# Altium footprint library LDCFullN.PcbLib: 36 footprints (part 2 of 3)
Each footprint in its own frame and in the unit in brackets; x right, y up, seen from the top. Pads: shape width x height; smd on the part's side, far side on the other; paste and mask are expansions set on the pad; w line width, h text height; cw(c..) or ccw(c..) is an arc to the next point about the centre after c.
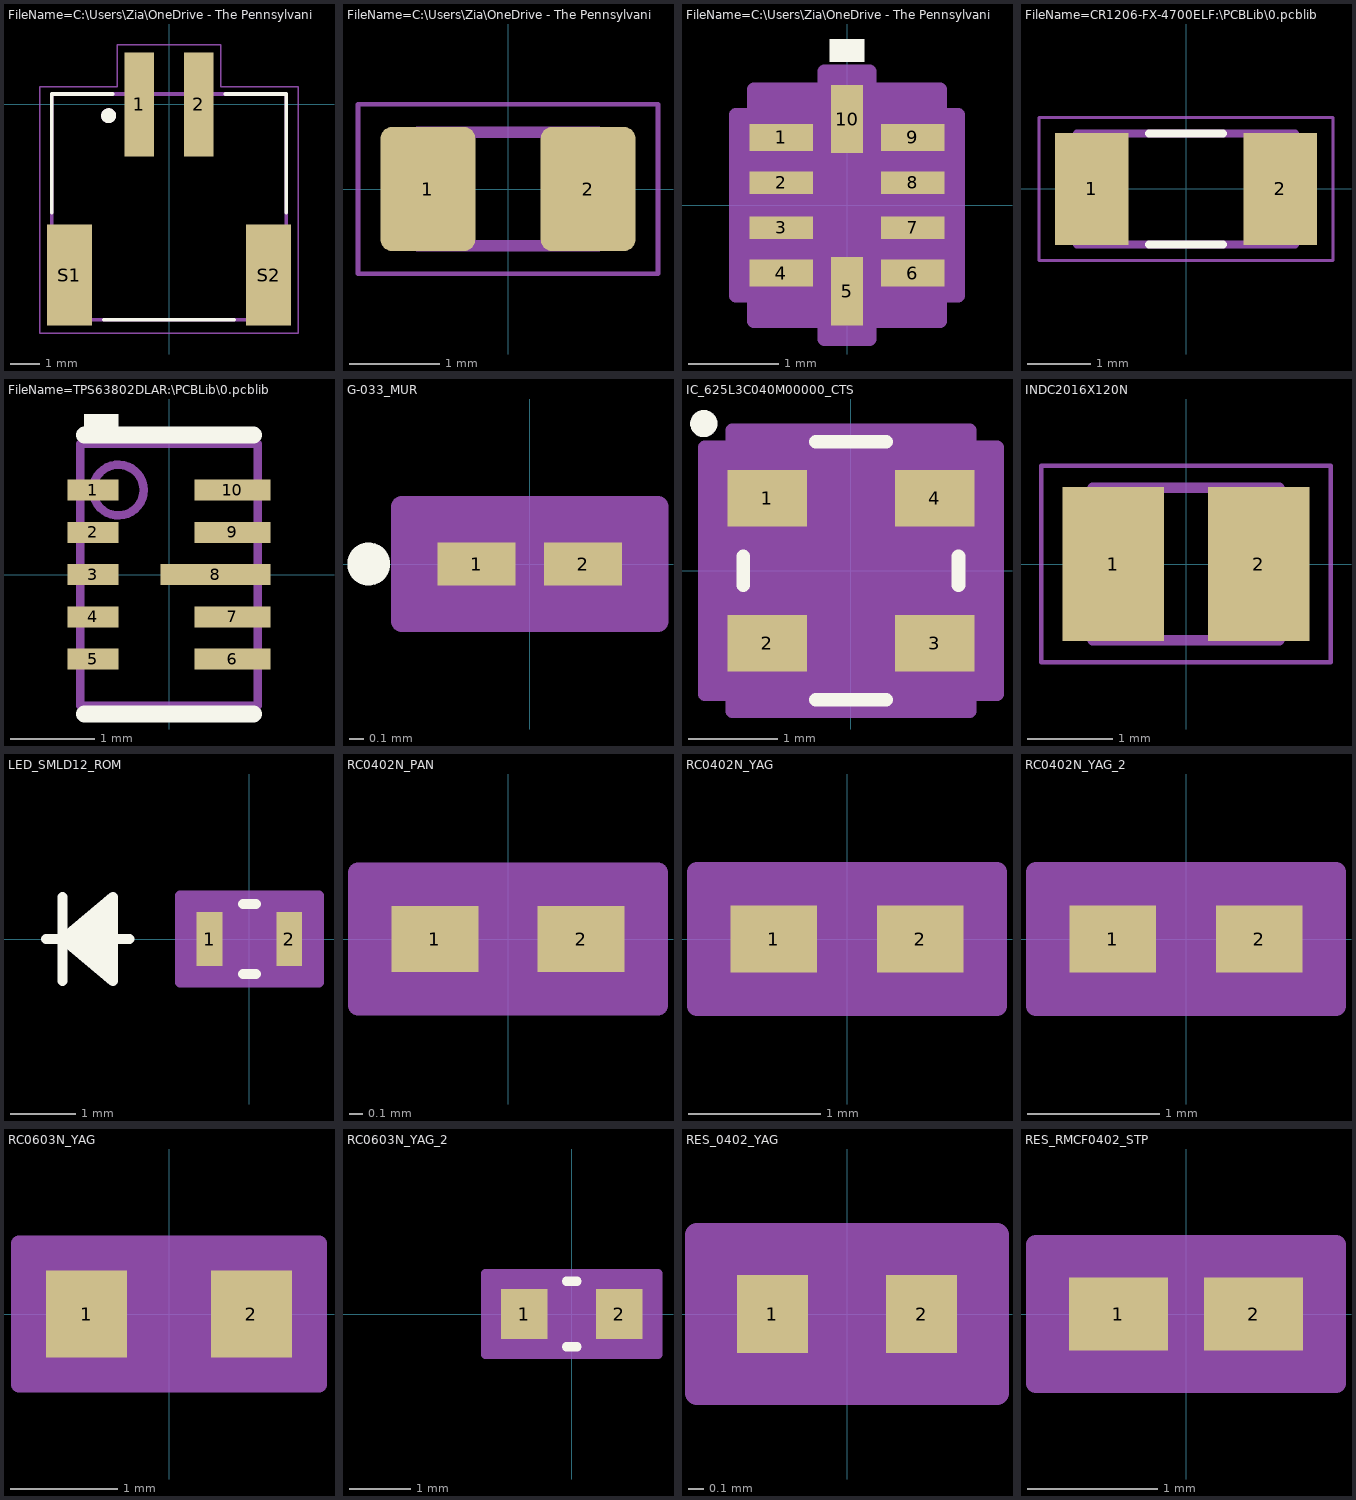
[diagram p1: the footprints below, top view; thin cyan lines are the x and y axes]

## FileName=C:\Users\Zia\OneDrive - The Pennsylvania State University\Desktop\LDCLast\Altium\S2B-PH-SM4-TB_LF__SN_2pin\JST_S2B-PH-SM4-TB(LF)(SN).PcbLib [mm]
pads (4):
  rect 1x3.5 smd: 1(-1,0) 2(1,0)
  rect 1.5x3.4 smd: S1(-3.35,-5.75) S2(3.35,-5.75)
Top Overlay:
  circle w0.3: c-2.032,-0.381 r0.1
  lines w0.127: -3.95,-3.65 -3.95,0.35 -1.9,0.35 ; -2.2,-7.25 2.2,-7.25 ; 1.9,0.35 3.95,0.35 3.95,-3.65
Mechanical 13:
  circle w0.3: c-2.032,-0.381 r0.1
  lines w0.127: -3.95,-7.25 -3.95,0.35 3.95,0.35 3.95,-7.25 -3.95,-7.25
Mechanical 15:
  lines w0.05: -4.35,-7.7 4.35,-7.7 4.35,0.6 1.75,0.6 1.75,2 -1.75,2 -1.75,0.6 -4.35,0.6 -4.35,-7.7
3D body "step_temp.STEP": height 5.5, standoff -0.1, extent -4.077,-7.965 3.823,0.635

## FileName=C:\Users\Zia\OneDrive - The Pennsylvania State University\Desktop\LDCLast\AltiumLib\CL21A106KPFNNNG (10,100U)\CAPC2012X135N.PcbLib [mm]
pads (2):
  rrect25% 1.05x1.38 smd: 1(-0.888,0) 2(0.888,0)
Mechanical 13:
  lines w0.127: -1,-0.63 1,-0.63 1,0.63 -1,0.63 -1,-0.63
Mechanical 15:
  lines w0.05: -1.663,-0.94 1.663,-0.94 1.663,0.94 -1.663,0.94 -1.663,-0.94
3D body "step_temp.STEP": height 1.35, standoff 0, extent -1,-0.625 1,0.625

## FileName=C:\Users\Zia\OneDrive - The Pennsylvania State University\Desktop\LDCLast\AltiumLib\TS5A23157RSER\TS5A23157RSER.PcbLib [mm]
pads (10):
  rect 0.705x0.3 smd: 1(-0.727,0.75) 4(-0.727,-0.75) 6(0.727,-0.75) 9(0.727,0.75)
  rect 0.705x0.25 smd: 2(-0.727,0.25) 3(-0.727,-0.25) 7(0.727,-0.25) 8(0.727,0.25)
  rect 0.35x0.755 smd: 5(0,-0.952) 10(0,0.952)
Top Overlay:
  region: 0.191,1.584 -0.191,1.584 -0.191,1.838 0.191,1.838
Mechanical 13:
  lines w0.025: -0.775,-0.245 0.495,1.025 ; -0.775,-1.025 -0.775,1.025 0.775,1.025 0.775,-1.025 -0.775,-1.025 ; -0.775,-0.9 -0.775,-0.6 -0.775,-0.9 ; -0.775,-0.4 -0.775,-0.1 -0.775,-0.4 ; -0.775,0.1 -0.775,0.4 -0.775,0.1 ; -0.775,0.6 -0.775,0.9 -0.775,0.6 ; -0.15,-1.025 0.15,-1.025 -0.15,-1.025 ; -0.15,1.025 0.15,1.025 -0.15,1.025 ; 0.775,-0.9 0.775,-0.6 0.775,-0.9 ; 0.775,-0.4 0.775,-0.1 0.775,-0.4 ; 0.775,0.1 0.775,0.4 0.775,0.1 ; 0.775,0.6 0.775,0.9 0.775,0.6
  text "*" at -0.693,0.365 h1.27
Mechanical 15:
  region: -0.25,-1.279 -1.029,-1.279 -1.029,-1 -1.229,-1 -1.229,1 -1.029,1 -1.029,1.279 -0.25,1.279 -0.25,1.479 0.25,1.479 0.25,1.279 1.029,1.279 1.029,1 1.229,1 1.229,-1 1.029,-1 1.029,-1.279 0.25,-1.279 0.25,-1.479 -0.25,-1.479
  lines w0.152: -1.229,-1 -1.229,1 -1.029,1 -1.029,1.279 -0.25,1.279 -0.25,1.479 0.25,1.479 0.25,1.279 1.029,1.279 1.029,1 1.229,1 1.229,-1 1.029,-1 1.029,-1.279 0.25,-1.279 0.25,-1.479 -0.25,-1.479 -0.25,-1.279 -1.029,-1.279 -1.029,-1 -1.229,-1

## FileName=CR1206-FX-4700ELF:\PCBLib\0.pcblib [mm]
pads (2):
  rect 1.17x1.77 smd: 1(-1.494,0) 2(1.494,0)
Top Overlay:
  lines w0.127: -0.59,-0.88 0.59,-0.88 ; -0.59,0.88 0.59,0.88
Mechanical 13:
  lines w0.127: -1.73,-0.88 1.73,-0.88 1.73,0.88 -1.73,0.88 -1.73,-0.88
Mechanical 15:
  lines w0.05: -2.331,-1.135 2.331,-1.135 2.331,1.135 -2.331,1.135 -2.331,-1.135
3D body "step_temp.STEP": height 0.75, standoff 0, extent -1.6,-0.8 1.6,0.8

## FileName=TPS63802DLAR:\PCBLib\0.pcblib [mm]
pads (10):
  rect 0.6x0.25 smd paste+0 mask+0: 1(-0.9,1) 2(-0.9,0.5) 3(-0.9,0) 4(-0.9,-0.5) 5(-0.9,-1)
  rect 0.9x0.25 smd paste+0 mask+0: 6(0.75,-1) 7(0.75,-0.5) 9(0.75,0.5) 10(0.75,1)
  rect 1.3x0.25 smd paste-0.637 mask+0: 8(0.55,0)
Top Overlay:
  region: -1,1.9 -1,1.65 -0.6,1.65 -0.6,1.9
  lines w0.2: -1,-1.65 1,-1.65 ; -1,1.65 1,1.65
Top Paste:
  region: -0.05,-0.125 -0.1,-0.075 -0.1,0.075 -0.05,0.125 0.4,0.125 0.45,0.075 0.45,-0.075 0.4,-0.125
  region: 0.7,-0.125 0.65,-0.075 0.65,0.075 0.7,0.125 1.15,0.125 1.2,0.075 1.2,-0.075 1.15,-0.125
Mechanical 13:
  circle w0.1: c-0.6,1 r0.3
  lines w0.1: -1.05,-1.55 1.05,-1.55 1.05,1.55 -1.05,1.55 -1.05,-1.55

## G-033_MUR [mil]
pads (2):
  rect 21.78x12 smd paste+0 mask+0: 1(-14.89,0) 2(14.89,0)
Top Overlay:
  circle w6: c-45,0 r3
Mechanical 13:
  circle w0: c-9.89,0 r3
  lines w1: -12,-6 -12,6 ; -12,-6 -4,-6 -4,6 -12,6 ; -12,-6 12,-6 ; -12,-6 -12,6 ; -12,6 12,6 ; 12,-6 4,-6 4,6 12,6 ; 12,-6 12,6 ; 12,-6 12,6
Mechanical 15:
  region: 35.78,-16 -35.78,-16 -35.78,16 35.78,16
  lines w6: -35.78,-16 -35.78,16 35.78,16 35.78,-16 -35.78,-16
3D body "G-033_MUR.step": height 12.99, standoff 0, extent -12.01,-5.98 12.01,5.98

## IC_625L3C040M00000_CTS [mil]
pads (4):
  rect 35x25 smd paste+0 mask+0: 1(-37,31.99) 2(-37,-31.99) 3(37,-31.99) 4(37,31.99)
Top Overlay:
  circle w6: c-65,65 r3
  lines w6: -47.5,-6.39 -47.5,6.39 ; -15.62,-57 15.62,-57 ; -15.62,57 15.62,57 ; 47.5,-6.39 47.5,6.39
Mechanical 13:
  lines w0: -12,52 ccw(c0,52) 12,52
  lines w1: -42.5,-52 -42.5,52 42.5,52 42.5,-52 -42.5,-52
Mechanical 15:
  region: -52.5,-54.49 -64.5,-54.49 -64.5,54.49 -52.5,54.49 -52.5,62 52.5,62 52.5,54.49 64.5,54.49 64.5,-54.49 52.5,-54.49 52.5,-62 -52.5,-62
  lines w6: -64.5,-54.49 -64.5,54.49 -52.5,54.49 -52.5,62 52.5,62 52.5,54.49 64.5,54.49 64.5,-54.49 52.5,-54.49 52.5,-62 -52.5,-62 -52.5,-54.49 -64.5,-54.49
3D body "IC_625L3C040M00000_CTS.step": height 39.09, standoff 0, extent -42.52,-52.01 42.52,52.01

## INDC2016X120N [mm]
pads (2):
  rect 1.2x1.82 smd: 1(-0.86,0) 2(0.86,0)
Mechanical 13:
  lines w0.127: -1.1,-0.9 -1.1,0.9 1.1,0.9 1.1,-0.9 -1.1,-0.9
Mechanical 15:
  lines w0.05: -1.708,-1.158 -1.708,1.158 1.708,1.158 1.708,-1.158 -1.708,-1.158
3D body "step_temp.STEP": height 1.2, standoff 0, extent -1,-0.8 1,0.8

## LED_SMLD12_ROM [mil]
pads (2):
  rect 15.5x32 smd: 1(-23.75,0) 2(23.75,0)
Top Overlay:
  lines w6: -121.5,0 -71.5,0 ; -111.5,-25 -111.5,25 ; -81.5,-20 -111.5,0 ; -81.5,-15 -111.5,0 ; -81.5,-10 -111.5,0 ; -81.5,-5 -111.5,0 ; -81.5,5 -111.5,0 ; -81.5,10 -111.5,0 ; -81.5,15 -111.5,0 ; -81.5,20 -111.5,0 ; -3.89,-21 3.89,-21 ; -3.89,21 3.89,21 ; -111.5,0 -81.5,25 -81.5,-25 -111.5,0
Mechanical 13:
  lines w1: -121.5,0 -71.5,0 ; -111.5,-25 -111.5,25 ; -81.5,-20 -111.5,0 ; -81.5,-15 -111.5,0 ; -81.5,-10 -111.5,0 ; -81.5,-5 -111.5,0 ; -81.5,5 -111.5,0 ; -81.5,10 -111.5,0 ; -81.5,15 -111.5,0 ; -81.5,20 -111.5,0 ; -111.5,0 -81.5,25 -81.5,-25 -111.5,0 ; -31.5,-16 31.5,-16 31.5,16 -31.5,16 -31.5,-16 ; -23.62,-16 -23.62,16 23.62,16 23.62,-16 -23.62,-16
Mechanical 15:
  region: -41.5,-26 -41.5,26 41.5,26 41.5,-26
  lines w6: -41.5,-26 -41.5,26 41.5,26 41.5,-26 -41.5,-26

## RC0402N_PAN [mm]
pads (2):
  rect 0.656x0.5 smd paste+0 mask+0: 1(-0.553,0) 2(0.553,0)
Mechanical 13:
  lines w0.025: -0.525,-0.25 -0.525,0.25 ; -0.525,-0.25 -0.225,-0.25 -0.225,0.25 -0.525,0.25 ; -0.525,-0.25 0.525,-0.25 ; -0.525,-0.25 -0.525,0.25 ; -0.525,0.25 0.525,0.25 ; 0.525,-0.25 0.225,-0.25 0.225,0.25 0.525,0.25 ; 0.525,-0.25 0.525,0.25 ; 0.525,-0.25 0.525,0.25
Mechanical 15:
  region: 1.135,-0.504 -1.135,-0.504 -1.135,0.504 1.135,0.504
  lines w0.152: -1.135,-0.504 -1.135,0.504 1.135,0.504 1.135,-0.504 -1.135,-0.504
3D body "RC0402N_PAN.step": height 0.71, standoff 0, extent -0.525,-0.25 0.525,0.25

## RC0402N_YAG [mil]
pads (2):
  rect 25.78x20 smd paste+0 mask+0: 1(-21.89,0) 2(21.89,0)
Mechanical 13:
  lines w1: -21,-10 -21,10 ; -21,-10 21,-10 ; -21,-10 -9,-10 -9,10 -21,10 ; -21,-10 -21,10 ; -21,10 21,10 ; 21,-10 21,10 ; 21,-10 21,10 ; 21,-10 9,-10 9,10 21,10
Mechanical 15:
  region: 44.78,-20 -44.78,-20 -44.78,20 44.78,20
  lines w6: -44.78,-20 44.78,-20 44.78,20 -44.78,20 -44.78,-20
3D body "RC0402N_YAG.step": height 27.99, standoff 0, extent -20.98,-10 20.98,10

## RC0402N_YAG_2 [mil]
pads (2):
  rect 25.78x20 smd paste+0 mask+0: 1(-21.89,0) 2(21.89,0)
Mechanical 13:
  lines w1: -21,-10 -21,10 ; -21,-10 21,-10 ; -21,-10 -9,-10 -9,10 -21,10 ; -21,-10 -21,10 ; -21,10 21,10 ; 21,-10 21,10 ; 21,-10 21,10 ; 21,-10 9,-10 9,10 21,10
Mechanical 15:
  region: 44.78,-20 -44.78,-20 -44.78,20 44.78,20
  lines w6: -44.78,-20 44.78,-20 44.78,20 -44.78,20 -44.78,-20
3D body "RC0402N_YAG.step": height 27.99, standoff 0, extent -20.98,-10 20.98,10

## RC0603N_YAG [mil]
pads (2):
  rect 29.78x32 smd paste+0 mask+0: 1(-30.39,0) 2(30.39,0)
Mechanical 13:
  lines w1: -31.5,-16 -31.5,16 ; -31.5,-16 31.5,-16 ; -31.5,-16 -10,-16 -10,16 -31.5,16 ; -31.5,-16 -31.5,16 ; -31.5,16 31.5,16 ; 31.5,-16 31.5,16 ; 31.5,-16 31.5,16 ; 31.5,-16 15.5,-16 15.5,16 31.5,16
Mechanical 15:
  region: 55.28,-26 -55.28,-26 -55.28,26 55.28,26
  lines w6: -55.28,-26 55.28,-26 55.28,26 -55.28,26 -55.28,-26
3D body "RC0603N_YAG.step": height 27.99, standoff 0, extent -31.5,-15.98 31.5,15.98

## RC0603N_YAG_2 [mil]
pads (2):
  rect 30x32 smd paste+0 mask+0: 1(-30.5,0) 2(30.5,0)
Top Overlay:
  lines w6: -3.39,-21 3.39,-21 ; -3.39,21 3.39,21
Mechanical 13:
  lines w1: -31.5,-16 -31.5,16 ; -31.5,-16 -15.5,-16 -15.5,16 -31.5,16 ; -31.5,-16 31.5,-16 ; -31.5,-16 -31.5,16 ; -31.5,16 31.5,16 ; 31.5,-16 15.5,-16 15.5,16 31.5,16 ; 31.5,-16 31.5,16 ; 31.5,-16 31.5,16
Mechanical 15:
  region: 55.5,-26 -55.5,-26 -55.5,26 55.5,26
  lines w6: -55.5,-26 -55.5,26 55.5,26 55.5,-26 -55.5,-26
3D body "RC0603N_YAG.step": height 27.99, standoff 0, extent -31.5,-15.98 31.5,15.98

## RES_0402_YAG [mm]
pads (2):
  rect 0.453x0.5 smd paste+0 mask+0: 1(-0.477,0) 2(0.477,0)
Mechanical 13:
  lines w0.025: -0.5,-0.25 -0.5,0.25 ; -0.5,-0.25 0.5,-0.25 ; -0.5,-0.25 -0.25,-0.25 -0.25,0.25 -0.5,0.25 ; -0.5,-0.25 -0.5,0.25 ; -0.5,0.25 0.5,0.25 ; 0.5,-0.25 0.5,0.25 ; 0.5,-0.25 0.5,0.25 ; 0.5,-0.25 0.25,-0.25 0.25,0.25 0.5,0.25
Mechanical 15:
  region: 0.957,-0.504 -0.957,-0.504 -0.957,0.504 0.957,0.504
  lines w0.152: -0.957,-0.504 0.957,-0.504 0.957,0.504 -0.957,0.504 -0.957,-0.504
3D body "RES_0402_YAG.step": height 0.35, standoff 0, extent -0.5,-0.25 0.5,0.25

## RES_RMCF0402_STP [mil]
pads (2):
  rect 30x22 smd paste+0 mask+0: 1(-20.5,0) 2(20.5,0)
Mechanical 13:
  lines w1: -21.5,-11 -21.5,11 ; -21.5,-11 -5.5,-11 -5.5,11 -21.5,11 ; -21.5,-11 21.5,-11 ; -21.5,-11 -21.5,11 ; -21.5,11 21.5,11 ; 21.5,-11 5.5,-11 5.5,11 21.5,11 ; 21.5,-11 21.5,11 ; 21.5,-11 21.5,11
Mechanical 15:
  region: 45.5,-21 -45.5,-21 -45.5,21 45.5,21
  lines w6: -45.5,-21 -45.5,21 45.5,21 45.5,-21 -45.5,-21
3D body "RES_RMCF0402_STP.step": height 14.02, standoff 0, extent -21.5,-10.98 21.5,10.98